# Altium integrated library Grantiot_.IntLib: 130 symbols (part 4 of 4)
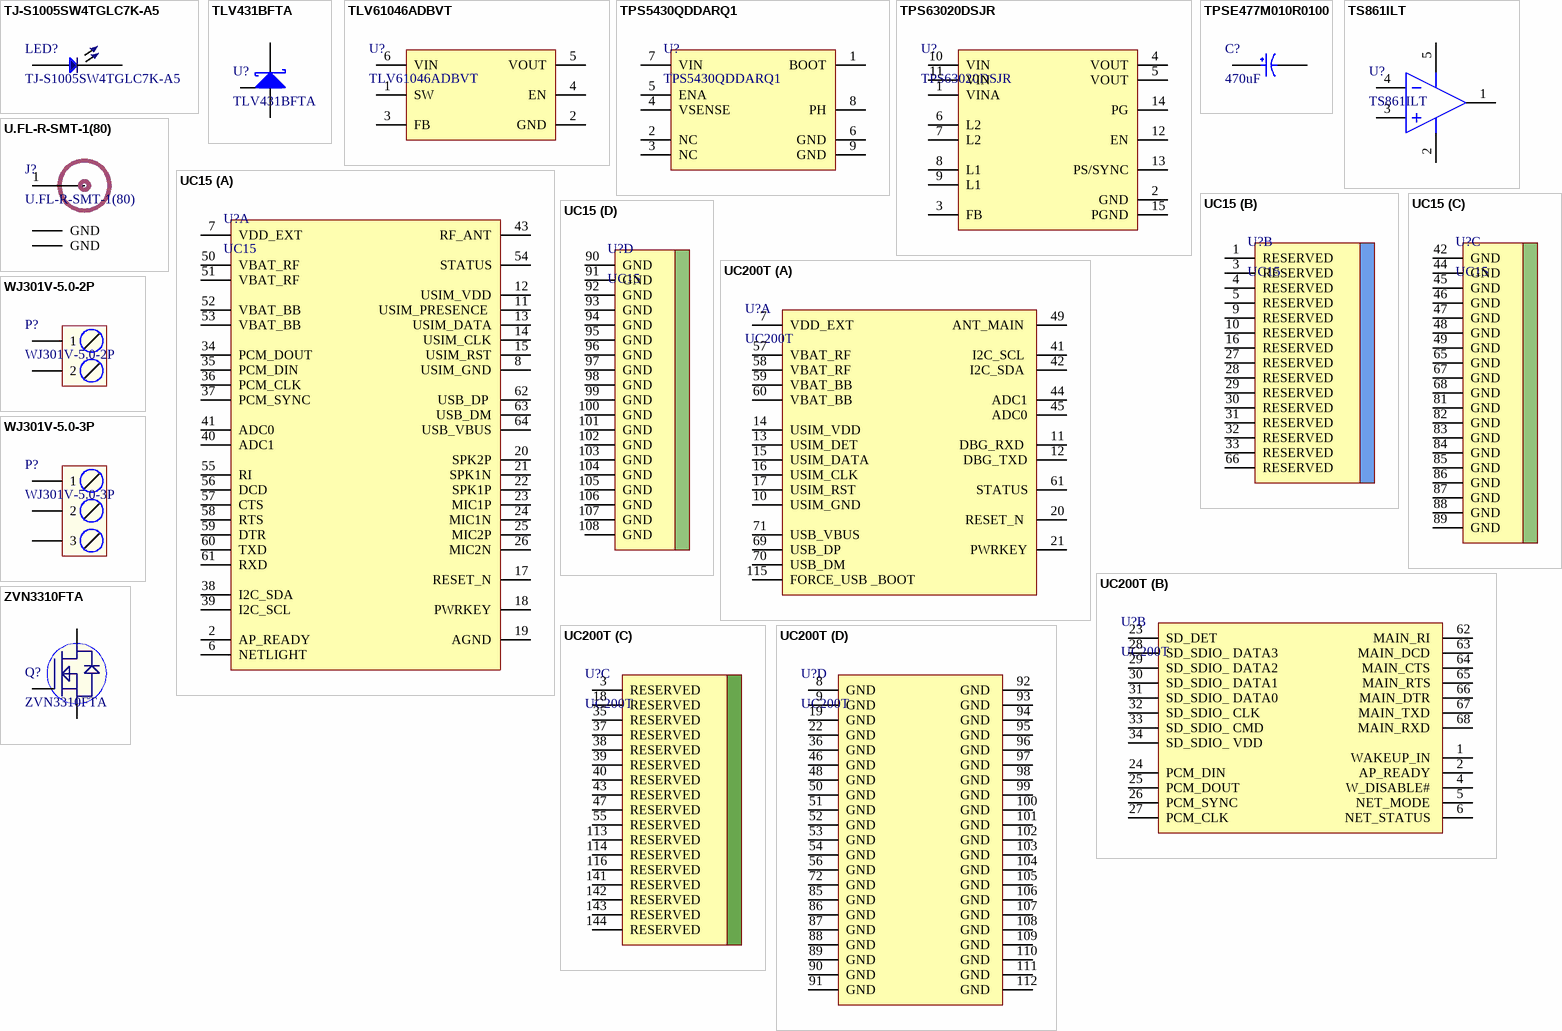
[diagram p6: symbols TJ-S1005SW4TGLC7K-A5 to ZVN3310FTA]

## TLV61046ADBVT
designator U?
IC REG BOOST ADJ SOT23-6; Manufacturer: Texas Instruments; Output Type: Adjustable; Output Configuration: Positive; Number of Outputs: 1; Min Input Voltage: 1.8V; Max Input Voltage: 5.5V; Min Output Voltage: 3.3V; Max Output Voltage: 28V; Switching Frequency: 1.05MHz; Supplier 1: Digi-Key; Manufacturer Part Number: TLV61046ADBVT; Stock 1: 7662; Pricing 1: 1=1.17, 10=1.047, 25=0.994, 100=0.7633 (USD); Mount: Surface Mount; Case/Package: SOT-23-6; Min Operating Temperature: -40°C; Max Operating Temperature: 125°C; Topology: Boost; Packaging: Tape and Reel; ComponentLink1URL: http://www.ti.com/lit/ds/symlink/tlv61046a.pdf?src-supplier=Digi-Key; ComponentLink1Description: http://www.ti.com/lit/ds/symlink/tlv61046a.pdf?src-supplier=Digi-Key; ComponentLink2URL: http://www.ti.com/lit/ds/slvsd82a/slvsd82a.pdf?src-supplier=Farnell; ComponentLink2Description: http://www.ti.com/lit/ds/slvsd82a/slvsd82a.pdf?src-supplier=Farnell; Supplier Part Number 1: 296-46927-1-ND
footprint TLV61048DBVT
pins: 1 SW, 2 GND, 3 FB, 4 EN, 5 VOUT, 6 VIN

## TPS5430QDDARQ1
designator U?
IC REG BUCK ADJUSTABLE 3A 8SOPWR; Manufacturer: Texas Instruments; Efficiency: 95%; Number of Outputs: 1; Output Voltage: 31V; Min Input Voltage: 5.5V; Max Input Voltage: 36V; Switching Frequency: 500kHz; Synchronous Rectifier: No; Min Output Voltage: 1.22V; Quiescent Current: 3mA; Supplier 1: Digi-Key; Manufacturer Part Number: TPS5430QDDARQ1; Stock 1: 2547; Pricing 1: 1=4.81, 10=4.32, 25=4.0836, 100=3.3578, 250=3.01292, 500=2.904, 1000=2.41395 (USD); Mount: Surface Mount; Number of Pins: 8; Weight: 0.00249oz; Min Operating Temperature: -40°C; Max Operating Temperature: 125°C; Output Current: 3A; Packaging: Tape and Reel; Max Output Current: 3A; Package Quantity: 2500; Max Output Voltage: 31V; Operating Supply Voltage: 36V; Output Type: Adjustable; Radiation Hardening: No; REACH SVHC: No SVHC; Lead Free: Lead Free; ComponentLink1URL: http://www.ti.com/general/docs/lit/getliterature.tsp?genericPartNumber=TPS5430-Q1&&fileType=pdf&src-supplier=Avnet; ComponentLink1Description: http://www.ti.com/general/docs/lit/getliterature.tsp?genericPartNumber=TPS5430-Q1&&fileType=pdf&src-supplier=Avnet; ComponentLink2URL: http://focus.ti.com/lit/ds/symlink/tps5430-q1.pdf?src-supplier=Avnet+Europe; ComponentLink2Description: http://focus.ti.com/lit/ds/symlink/tps5430-q1.pdf?src-supplier=Avnet+Europe; ComponentLink3URL: http://www.ti.com/lit/ds/symlink/tps5430-q1.pdf?src-supplier=Digi-Key; ComponentLink3Description: http://www.ti.com/lit/ds/symlink/tps5430-q1.pdf?src-supplier=Digi-Key; ComponentLink4URL: http://www.farnell.com/datasheets/2019094.pdf?src-supplier=Element14; ComponentLink4Description: http://www.farnell.com/datasheets/2019094.pdf?src-supplier=Element14; ComponentLink5URL: http://www.ti.com/lit/gpn/tps5430-q1?src-supplier=Mouser; ComponentLink5Description: http://www.ti.com/lit/gpn/tps5430-q1?src-supplier=Mouser; ComponentLink6URL: http://datasheet.iiic.cc/texas_instruments/TPS5430QDDARQ1.pdf?src-supplier=IIIC; ComponentLink6Description: http://datasheet.iiic.cc/texas_instruments/TPS5430QDDARQ1.pdf?src-supplier=IIIC; Supplier Part Number 1: 296-23177-1-ND
footprint TPS5430QDDARQ1
pins: 1 BOOT, 2 NC, 3 NC, 4 VSENSE, 5 ENA, 6 GND, 7 VIN, 8 PH, 9 GND

## TPS63020DSJR
designator U?
IC REG BCK BST ADJ 3.5A 14VSON; Manufacturer: Texas Instruments; Nominal Supply Current: 50uA; Min Supply Voltage: 1.8V; Number of Outputs: 1; Output Voltage: 5.5V; Output Current: 3A; Efficiency: 96%; Switching Frequency: 2.4MHz; Min Output Voltage: 1.2V; Synchronous Rectifier: Yes; Topology: Buck-Boost; Output Type: Adjustable; Output Configuration: Positive; Supplier 1: Digi-Key; Manufacturer Part Number: TPS63020DSJR; Stock 1: 64117; Pricing 1: 1=2.86, 10=2.565, 25=2.42, 100=1.936, 250=1.694, 500=1.6456, 1000=1.3068 (USD); Mount: Surface Mount; Number of Pins: 14; Min Operating Temperature: -40°C; Max Operating Temperature: 85°C; Package Quantity: 3000; Packaging: Tape and Reel; Min Input Voltage: 1.8V; Max Output Current: 3A; Max Input Voltage: 5.5V; Max Output Voltage: 5.5V; Quiescent Current: 50uA; Operating Supply Voltage: 5.5V; Radiation Hardening: No; REACH SVHC: No SVHC; Lead Free: Lead Free; ComponentLink1URL: http://www.ti.com/lit/ds/symlink/tps63020.pdf?src-supplier=Digi-Key; ComponentLink1Description: http://www.ti.com/lit/ds/symlink/tps63020.pdf?src-supplier=Digi-Key; ComponentLink2URL: http://www.ti.com/general/docs/lit/getliterature.tsp?genericPartNumber=TPS63021&&fileType=pdf&src-supplier=Avnet; ComponentLink2Description: http://www.ti.com/general/docs/lit/getliterature.tsp?genericPartNumber=TPS63021&&fileType=pdf&src-supplier=Avnet; Supplier Part Number 1: 296-36491-1-ND
footprint TPS63020DSJR
pins: 1 VINA, 2 GND, 3 FB, 4 VOUT, 5 VOUT, 6 L2, 7 L2, 8 L1, 9 L1, 10 VIN, 11 VIN, 12 EN, 13 PS/SYNC, 14 PG, 15 PGND

## TPSE477M010R0100
designator C?, comment 470uF
CAP TANT 470UF 20% 10V 2917; Manufacturer: Kyocera AVX; Manufacturer Part Number: TPSE477M010R0100; Dielectric Material: Tantalum; ESR (Equivalent Series Resistance): 100mR; Polarity: Polar; Ripple Current: 514uA; Leakage Current: 47uA; Dissipation Factor: 10%; Approvals: IEC; Supplier 1: Digi-Key; Stock 1: 0; Pricing 1: 1=2.93, 10=2.372, 100=1.8113 (USD); Mount: Surface Mount,PCB; Case/Package: 2917; Number of Pins: 2; Case Code (Metric): 7343; Case Code (Imperial): 2917; Min Operating Temperature: -55°C; Max Operating Temperature: 125°C; Capacitance: 470uF; Tolerance: 20%; Packaging: Tape and Reel; Voltage Rating: 10V; Package Quantity: 1; Voltage Rating (DC): 10V; Termination: SMD/SMT; Voltage: 10V; Features: General Purpose; Length: 7.3mm; Height: 4.1mm; Depth: 4.3mm; Width: 0.169inch; Height - Seated (Max): 0.169inch; Radiation Hardening: No; REACH SVHC: No SVHC; Lead Free: Lead Free; ComponentLink1URL: http://www.avx.com/docs/catalogs/tps.pdf?src-supplier=Avnet; ComponentLink1Description: http://www.avx.com/docs/catalogs/tps.pdf?src-supplier=Avnet; ComponentLink2URL: http://datasheets.avx.com/TPS.pdf?src-supplier=Digi-Key; ComponentLink2Description: http://datasheets.avx.com/TPS.pdf?src-supplier=Digi-Key; ComponentLink3URL: https://www.alliedelec.com/m/d/83cf44e04b230909adf636c7cda0f956.pdf?src-supplier=Allied+Electronics; ComponentLink3Description: https://www.alliedelec.com/m/d/83cf44e04b230909adf636c7cda0f956.pdf?src-supplier=Allied+Electronics; ComponentLink4URL: http://datasheets.avx.com/tps.pdf?src-supplier=Future+Electronics; ComponentLink4Description: http://datasheets.avx.com/tps.pdf?src-supplier=Future+Electronics; ComponentLink5URL: http://uk.rs-online.com/webdocs/0962/0900766b80962b61.pdf?src-supplier=RSComponents; ComponentLink5Description: http://uk.rs-online.com/webdocs/0962/0900766b80962b61.pdf?src-supplier=RSComponents; ComponentLink6URL: http://www.mouser.com/ds/2/40/tps-776850.pdf?src-supplier=Mouser; ComponentLink6Description: http://www.mouser.com/ds/2/40/tps-776850.pdf?src-supplier=Mouser; ComponentLink7URL: http://www.farnell.com/datasheets/1724878.pdf?src-supplier=Element14; ComponentLink7Description: http://www.farnell.com/datasheets/1724878.pdf?src-supplier=Element14; Supplier Part Number 1: 478-4150-1-ND
pins: 1, 2

## TS861ILT
designator U?
IC COMPARATOR R-R MCRPWR SOT23-5; Manufacturer: STMicroelectronics; Voltage Gain: 240dB; Min Supply Voltage: 2.7V; Max Supply Voltage: 10V; Number of Channels: 1; Max Power Dissipation: 500mW; Nominal Supply Current: 14uA; Common Mode Rejection Ratio: 70dB; Input Offset Voltage (Vos): 15mV; Input Bias Current: 300pA; Quiescent Current: 16uA; Propagation Delay: 2us; Max Supply Current: 12uA; Output Current per Channel: 5mA; Response Time: 500ns; Power Supply Rejection Ratio (PSRR): 80dB; Supplier 1: Digi-Key; Manufacturer Part Number: TS861ILT; Stock 1: 13568; Pricing 1: 1=0.78, 10=0.682, 25=0.6412, 100=0.486, 250=0.4136, 500=0.39292, 1000=0.29986 (USD); Mount: Surface Mount; Case/Package: SOT-23; Number of Pins: 5; Min Operating Temperature: -40°C; Max Operating Temperature: 85°C; Package Quantity: 3000; Number of Elements: 1; Packaging: Tape and Reel; Max Input Current: 300pA; Power Dissipation: 500mW; Output Current: 5mA; Type: General Purpose; Radiation Hardening: No; REACH SVHC: No SVHC; Lead Free: Lead Free; ComponentLink1URL: http://www.farnell.com/datasheets/1690531.pdf?src-supplier=Element14; ComponentLink1Description: http://www.farnell.com/datasheets/1690531.pdf?src-supplier=Element14; ComponentLink2URL: http://www.st.com/content/ccc/resource/technical/document/datasheet/dd/d1/7d/d5/d5/ce/49/c5/CD00001705.pdf/files/CD00001705.pdf/jcr:content/translations/en.CD00001705.pdf?src-supplier=Digi-Key; ComponentLink2Description: http://www.st.com/content/ccc/resource/technical/document/datasheet/dd/d1/7d/d5/d5/ce/49/c5/CD00001705.pdf/files/CD00001705.pdf/jcr:content/translations/en.CD00001705.pdf?src-supplier=Digi-Key; ComponentLink3URL: http://www.mouser.com/ds/2/389/ts861-957384.pdf?src-supplier=Mouser; ComponentLink3Description: http://www.mouser.com/ds/2/389/ts861-957384.pdf?src-supplier=Mouser; ComponentLink4URL: https://www.verical.com/server-webapp/html/getDatasheet?partID=160028&src-supplier=Verical; ComponentLink4Description: https://www.verical.com/server-webapp/html/getDatasheet?partID=160028&src-supplier=Verical; ComponentLink5URL: http://www.produktinfo.conrad.com/datenblaetter/1100000-1199999/001185659-da-01-en-IC_COMPARATOR_R_R_TS861ILT_SOT_23_5_STM.pdf?src-supplier=Conrad; ComponentLink5Description: http://www.produktinfo.conrad.com/datenblaetter/1100000-1199999/001185659-da-01-en-IC_COMPARATOR_R_R_TS861ILT_SOT_23_5_STM.pdf?src-supplier=Conrad; Supplier Part Number 1: 497-6777-6-ND
footprint SOT23-5 (SOT23-5 Package)
pins: 1 OUT, 2 V- (power), 3 IN+, 4 IN-, 5 V+ (power)

## U.FL-R-SMT-1(80)
designator J?
CONN U.FL RCPT STR 50 OHM SMD; Manufacturer: Hirose; Supplier 1: Future Electronics; Manufacturer Part Number: U.FL-R-SMT-1(80); Stock 1: 1272; Pricing 1: 1=1.07, 500=0.785, 1500=0.74, 2500=0.72, 5000=0.695 (USD); Case/Package: SMD/SMT; Package Quantity: 10000; Packaging: Tape and Reel; Lead Free: Lead Free; ComponentLink1URL: https://www.hirose.com/product/en/download_file/key_name/U.FL-R-SMT-1%2880%29/category/Specification%20Sheet/doc_file_id/37638/?file_category_id=9&item_id=03310472280&is_series=&src-supplier=Digi-Key; ComponentLink1Description: https://www.hirose.com/product/en/download_file/key_name/U.FL-R-SMT-1%2880%29/category/Specification%20Sheet/doc_file_id/37638/?file_category_id=9&item_id=03310472280&is_series=&src-supplier=Digi-Key; ComponentLink2URL: http://www.mouser.com/ds/2/185/U.FL_catalog-939761.pdf?src-supplier=Mouser; ComponentLink2Description: http://www.mouser.com/ds/2/185/U.FL_catalog-939761.pdf?src-supplier=Mouser; Supplier Part Number 1: U.FL-R-SMT-1(80)-CUTT
footprint U.FL-R-SMT-1(80)
pins: 1 RF_IN, 2 GND, 3 GND

## UC15
designator U?
3G Module UC15-T LCC Package UMTS/HSDPA MODULE
footprint UTC15
part A pins: 2 AP_READY, 6 NETLIGHT, 7 VDD_EXT, 8 USIM_GND, 11 USIM_PRESENCE , 12 USIM_VDD, 13 USIM_DATA, 14 USIM_CLK, 15 USIM_RST, 17 RESET_N, 18 PWRKEY, 19 AGND, 20 SPK2P, 21 SPK1N, 22 SPK1P, 23 MIC1P, 24 MIC1N, 25 MIC2P, 26 MIC2N, 34 PCM_DOUT, 35 PCM_DIN, 36 PCM_CLK, 37 PCM_SYNC, 38 I2C_SDA, 39 I2C_SCL, 40 ADC1, 41 ADC0, 43 RF_ANT, 50 VBAT_RF, 51 VBAT_RF, 52 VBAT_BB, 53 VBAT_BB, 54 STATUS, 55 RI, 56 DCD, 57 CTS, 58 RTS, 59 DTR, 60 TXD, 61 RXD, 62 USB_DP , 63 USB_DM, 64 USB_VBUS
part B pins: 1 RESERVED, 3 RESERVED, 4 RESERVED, 5 RESERVED, 9 RESERVED, 10 RESERVED, 16 RESERVED, 27 RESERVED, 28 RESERVED, 29 RESERVED, 30 RESERVED, 31 RESERVED, 32 RESERVED, 33 RESERVED, 66 RESERVED
part C pins: 42 GND, 44 GND, 45 GND, 46 GND, 47 GND, 48 GND, 49 GND, 65 GND, 67 GND, 68 GND, 81 GND, 82 GND, 83 GND, 84 GND, 85 GND, 86 GND, 87 GND, 88 GND, 89 GND
part D pins: 90 GND, 91 GND, 92 GND, 93 GND, 94 GND, 95 GND, 96 GND, 97 GND, 98 GND, 99 GND, 100 GND, 101 GND, 102 GND, 103 GND, 104 GND, 105 GND, 106 GND, 107 GND, 108 GND

## UC200T
designator U?
UMTS/HSPA+ Module; Manufacturer: Quectel; Value: Custom; Manufacturer Part No: UC200T; Package: Custom
footprint UC200T
part A pins: 7 VDD_EXT, 10 USIM_GND, 11 DBG_RXD , 12 DBG_TXD, 13 USIM_DET , 14 USIM_VDD , 15 USIM_DATA , 16 USIM_CLK , 17 USIM_RST , 20 RESET_N , 21 PWRKEY, 41 I2C_SCL , 42 I2C_SDA , 44 ADC1, 45 ADC0, 49 ANT_MAIN , 57 VBAT_RF , 58 VBAT_RF , 59 VBAT_BB , 60 VBAT_BB , 61 STATUS, 69 USB_DP , 70 USB_DM , 71 USB_VBUS , 115 FORCE_USB _BOOT
part B pins: 1 WAKEUP_IN , 2 AP_READY , 4 W_DISABLE# , 5 NET_MODE , 6 NET_STATUS , 23 SD_DET , 24 PCM_DIN , 25 PCM_DOUT , 26 PCM_SYNC , 27 PCM_CLK , 28 SD_SDIO_ DATA3 , 29 SD_SDIO_ DATA2 , 30 SD_SDIO_ DATA1 , 31 SD_SDIO_ DATA0, 32 SD_SDIO_ CLK, 33 SD_SDIO_ CMD, 34 SD_SDIO_ VDD, 62 MAIN_RI , 63 MAIN_DCD , 64 MAIN_CTS , 65 MAIN_RTS , 66 MAIN_DTR , 67 MAIN_TXD , 68 MAIN_RXD 
part C pins: 3 RESERVED, 18 RESERVED, 35 RESERVED, 37 RESERVED, 38 RESERVED, 39 RESERVED, 40 RESERVED, 43 RESERVED, 47 RESERVED, 55 RESERVED, 113 RESERVED, 114 RESERVED, 116 RESERVED, 141 RESERVED, 142 RESERVED, 143 RESERVED, 144 RESERVED
part D pins: 8 GND , 9 GND , 19 GND, 22 GND , 36 GND , 46 GND , 48 GND , 50 GND , 51 GND , 52 GND , 53 GND , 54 GND , 56 GND , 72 GND , 85 GND , 86 GND , 87 GND , 88 GND , 89 GND , 90 GND , 91 GND , 92 GND , 93 GND , 94 GND , 95 GND , 96 GND , 97 GND , 98 GND , 99 GND , 100 GND , 101 GND , 102 GND , 103 GND , 104 GND , 105 GND , 106 GND , 107 GND , 108 GND , 109 GND , 110 GND , 111 GND , 112 GND 

## WJ301V-5.0-2P
designator P?
P=5.0mm Screw terminal RoHS; Manufacturer: Ningbo Kangnex Elec; Value: Custom; Manufacturer Part No: WJ301V-5.0-2P; Package: Custom
footprint WJ301V-5.0-2P
pins: 1, 2

## WJ301V-5.0-3P
designator P?
P=5.0mm Screw terminal RoHS; Manufacturer: Ningbo Kangnex Elec; Value: Custom; Manufacturer Part No: WJ301V-5.0-3P; Package: Custom
footprint WJ301V-5.0-3P
pins: 1, 2, 3

## ZVN3310FTA
designator Q?
MOSFET N-CH 100V .1A SOT23-3; Manufacturer: Diodes Zetex; Rise Time: 5ns; Continuous Drain Current (ID): 100mA; Gate to Source Voltage (Vgs): 20V; Turn-Off Delay Time: 4ns; Turn-On Delay Time: 3ns; Rds On Max: 10R; Input Capacitance: 40pF; Nominal Vgs: 2.4V; Max Power Dissipation: 330mW; Number of Elements: 1; Element Configuration: Single; Supplier 1: Digi-Key; Manufacturer Part Number: ZVN3310FTA; Stock 1: 16974; Pricing 1: 1=0.59, 10=0.517, 25=0.4852, 100=0.3522, 250=0.33972, 500=0.29432, 1000=0.25048 (USD); Mount: Surface Mount; Case/Package: SOT-23; Number of Pins: 3; Weight: 0.000282oz; Min Operating Temperature: -55°C; Max Operating Temperature: 150°C; Package Quantity: 3000; Packaging: Tape and Reel; Dual Supply Voltage: 100V; Drain to Source Voltage (Vdss): 100V; Number of Channels: 1; Drain to Source Breakdown Voltage: 100V; Drain to Source Resistance: 10R; Fall Time: 5ns; On-State Resistance: 10R; Power Dissipation: 330mW; Termination: SMD/SMT; Threshold Voltage: 2.4V; Voltage Rating (DC): 100V; Current Rating: 100mA; Current: 100mA; Voltage: 100V; Length: 3.04mm; Height: 1.02mm; Width: 1.4mm; Radiation Hardening: No; REACH SVHC: No SVHC; Lead Free: Lead Free; ComponentLink1URL: http://www.diodes.com/_files/datasheets/ZVN3310F.pdf?src-supplier=Digi-Key; ComponentLink1Description: http://www.diodes.com/_files/datasheets/ZVN3310F.pdf?src-supplier=Digi-Key; Supplier Part Number 1: ZVN3310FCT-ND
footprint SOT23-3 (SOT23, 3-Leads, Body 2.9x1.3mm, Pitch 0.95mm, Lead Span 2.3mm - Reverse Pinning, IPC High Density)
pins: 1 G, 2 S, 3 D